# EAGLE library part TPS2115AIPWRQ1 (library TPS2115AIPWRQ1)
Automotive Autoswitching Power Mux Source: Datasheet <http://componentsearchengine.com/Datasheets/1/TPS2115AIPWRQ1.pdf>
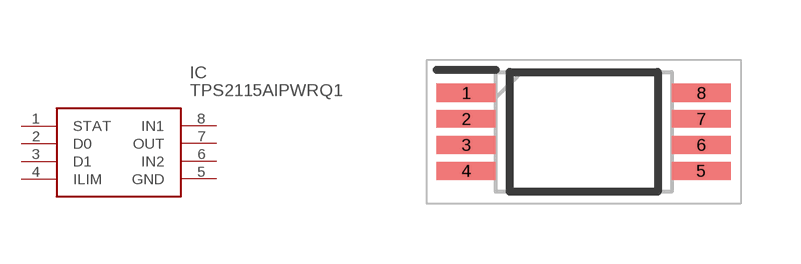
[diagram p0: symbol with the pads of SOP65P640X120-8N; footprint SOP65P640X120-8N]

Designator prefix IC

## TPS2115AIPWRQ1 (Description: Automotive Autoswitching Power Mux; Height: 1.2mm; Manufacturer_Name: Texas Instruments; Manufacturer_Part_Number: TPS2115AIPWRQ1; Mouser_Part_Number: 595-TPS2115AIPWRQ1; Mouser_Price-Stock: https://www.mouser.co.uk/ProductDetail/Texas-Instruments/TPS2115AIPWRQ1?qs=IDSsxkoac0yJ8twoaysKxw%3D%3D)  [SOP65P640X120-8N]
1  STAT
2  D0
3  D1
4  ILIM
5  GND
6  IN2
7  OUT
8  IN1

## Footprint SOP65P640X120-8N (pad centres in mm)
8 tssop
smd 1.475 x 0.45: 1 -2.938,0.975; 2 -2.938,0.325; 3 -2.938,-0.325; 4 -2.938,-0.975; 5 2.938,-0.975; 6 2.938,-0.325; 7 2.938,0.325; 8 2.938,0.975